# Altium integrated library SS34L.IntLib: 1 symbol
Pins are listed as number, name and electrical type; pins without a type are passive.

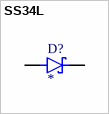
[diagram p0: symbol SS34L]

## SS34L
designator D?
3A, 40V, Planar Schottky; MF: Taiwan Semiconductor; MP: SS34L; SnapEDA_Link: https://www.snapeda.com/parts/SS34L/taiwan/view-part/?ref=snap; Package: SUB SMA-2 Taiwan Semiconductor; Value: *; Check_prices: https://www.snapeda.com/parts/SS34L/taiwan/view-part/?ref=eda
footprint SODFL3618X143N
pins: A, C K